# Altium schematic symbol library 1437566-3.SchLib: 1 symbol
Pins are listed as number, name and electrical type; pins without a type are passive.

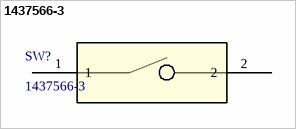
[diagram p0: symbol 1437566-3]

## 1437566-3
designator SW?
No Description Available; Manufacturer_Name: TE Connectivity; Copyright: Copyright (C) 2026 Ultra Librarian. All rights reserved.; Manufacturer_Part_Number: 1437566-3; RefDes: RefDes; Type: Type
footprint SW2_1437566_TEC
pins: 1, 2